# Altium footprint library MY_LIB_Connectors_JST.PcbLib: 118 footprints (part 6 of 8)
Each footprint in its own frame and in the unit in brackets; x right, y up, seen from the top. Pads: shape width x height; smd on the part's side, far side on the other; paste and mask are expansions set on the pad; w line width, h text height; cw(c..) or ccw(c..) is an arc to the next point about the centre after c.
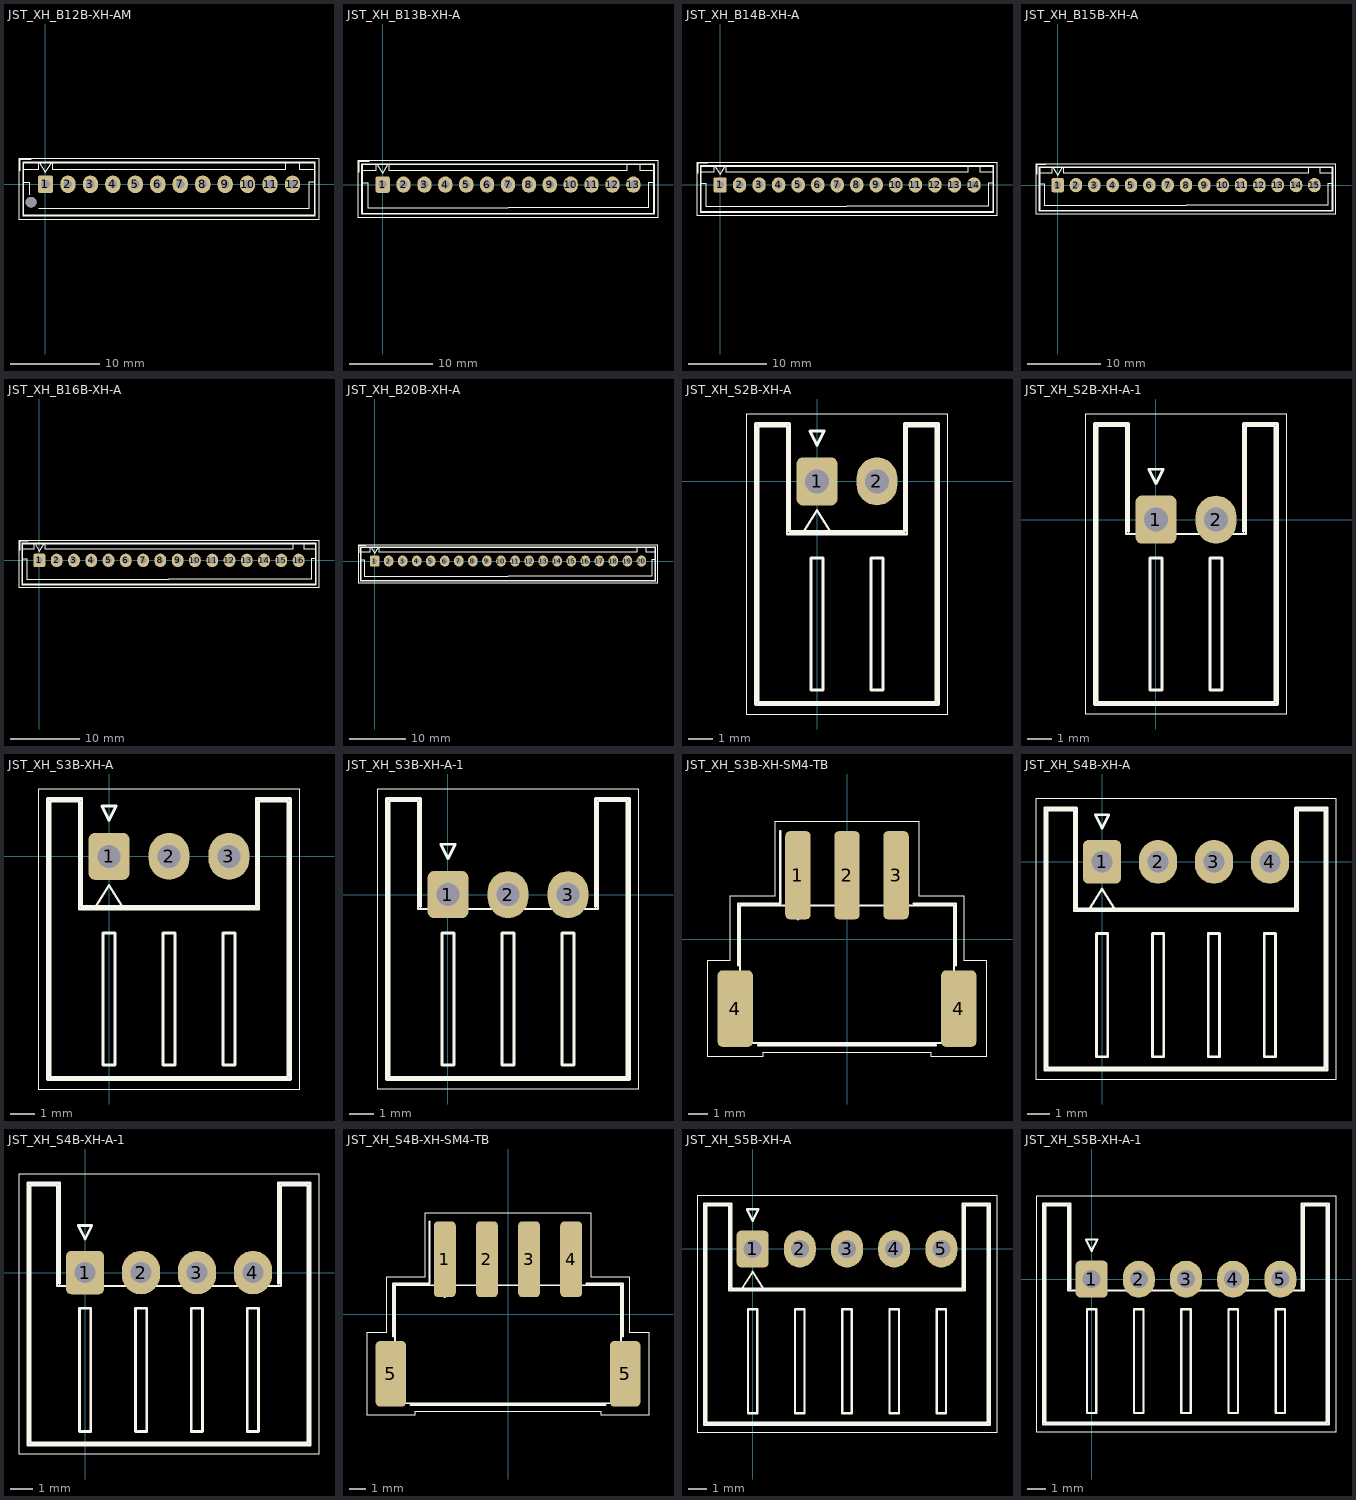
[diagram p5: the footprints below, top view; thin cyan lines are the x and y axes]

## JST_XH_B12B-XH-AM [mm] "JST B12B-XH-AM; reviewed KiCad footprint; ready STEP reference model"
height 7
pads (13):
  rrect29% 1.7x1.95 hole 0.95: 1(0,0)
  oval 1.7x1.95 hole 0.95: 2(2.5,0) 3(5,0) 4(7.5,0) 5(10,0) 6(12.5,0) 7(15,0) 8(17.5,0) 9(20,0) 10(22.5,0) 11(25,0) 12(27.5,0)
  round 1.2 hole 1.2 unplated: ""(-1.6,-2)
Top Overlay:
  lines w0.05: -2.95,-3.9 -2.95,2.85 30.45,2.85 30.45,-3.9 -2.95,-3.9
  lines w0.1: -0.625,2.35 0,1.35 0.625,2.35 ; -2.45,-3.4 -2.45,2.35 29.95,2.35 29.95,-3.4 -2.45,-3.4
  lines w0.12: -2.85,1.5 -2.85,2.75 -1.6,2.75 ; -2.55,0.2 -1.8,0.2 -1.8,-1.14 ; -0.74,-2.75 13.75,-2.75 29.3,-2.75 29.3,0.2 30.05,0.2 ; -2.56,-3.51 -2.56,2.46 30.06,2.46 30.06,-3.51 -2.56,-3.51 ; -2.55,1.7 -2.55,2.45 -0.75,2.45 -0.75,1.7 -2.55,1.7 ; 0.75,1.7 0.75,2.45 26.75,2.45 26.75,1.7 0.75,1.7 ; 28.25,1.7 28.25,2.45 30.05,2.45 30.05,1.7 28.25,1.7
3D body "B12B-XH-AM.step": height 7, standoff -3.5, extent -2.45,-3.4 29.95,2.35

## JST_XH_B13B-XH-A [mm] "JST B13B-XH-A; reviewed KiCad footprint; ready STEP reference model"
height 7
pads (13):
  rrect29% 1.7x1.95 hole 0.95: 1(0,0)
  oval 1.7x1.95 hole 0.95: 2(2.5,0) 3(5,0) 4(7.5,0) 5(10,0) 6(12.5,0) 7(15,0) 8(17.5,0) 9(20,0) 10(22.5,0) 11(25,0) 12(27.5,0) 13(30,0)
Top Overlay:
  lines w0.05: -2.95,-3.9 -2.95,2.85 32.95,2.85 32.95,-3.9 -2.95,-3.9
  lines w0.1: -0.625,2.35 0,1.35 0.625,2.35 ; -2.45,-3.4 -2.45,2.35 32.45,2.35 32.45,-3.4 -2.45,-3.4
  lines w0.12: -2.85,1.5 -2.85,2.75 -1.6,2.75 ; -2.55,0.2 -1.8,0.2 -1.8,-2.75 15,-2.75 31.8,-2.75 31.8,0.2 32.55,0.2 ; -2.56,-3.51 -2.56,2.46 32.56,2.46 32.56,-3.51 -2.56,-3.51 ; -2.55,1.7 -2.55,2.45 -0.75,2.45 -0.75,1.7 -2.55,1.7 ; 0.75,1.7 0.75,2.45 29.25,2.45 29.25,1.7 0.75,1.7 ; 30.75,1.7 30.75,2.45 32.55,2.45 32.55,1.7 30.75,1.7
3D body "JST_XH_B13B-XH-A_1x13_P2.50mm_Vertical.step": height 7, standoff -3.4, extent -2.45,-3.4 32.45,2.35

## JST_XH_B14B-XH-A [mm] "JST B14B-XH-A; reviewed KiCad footprint; ready STEP reference model"
height 7
pads (14):
  rrect29% 1.7x1.95 hole 0.95: 1(0,0)
  oval 1.7x1.95 hole 0.95: 2(2.5,0) 3(5,0) 4(7.5,0) 5(10,0) 6(12.5,0) 7(15,0) 8(17.5,0) 9(20,0) 10(22.5,0) 11(25,0) 12(27.5,0) 13(30,0) 14(32.5,0)
Top Overlay:
  lines w0.05: -2.95,-3.9 -2.95,2.85 35.45,2.85 35.45,-3.9 -2.95,-3.9
  lines w0.1: -0.625,2.35 0,1.35 0.625,2.35 ; -2.45,-3.4 -2.45,2.35 34.95,2.35 34.95,-3.4 -2.45,-3.4
  lines w0.12: -2.85,1.5 -2.85,2.75 -1.6,2.75 ; -2.55,0.2 -1.8,0.2 -1.8,-2.75 16.25,-2.75 34.3,-2.75 34.3,0.2 35.05,0.2 ; -2.56,-3.51 -2.56,2.46 35.06,2.46 35.06,-3.51 -2.56,-3.51 ; -2.55,1.7 -2.55,2.45 -0.75,2.45 -0.75,1.7 -2.55,1.7 ; 0.75,1.7 0.75,2.45 31.75,2.45 31.75,1.7 0.75,1.7 ; 33.25,1.7 33.25,2.45 35.05,2.45 35.05,1.7 33.25,1.7
3D body "JST_XH_B14B-XH-A_1x14_P2.50mm_Vertical.step": height 7, standoff -3.4, extent -2.45,-3.4 34.95,2.35

## JST_XH_B15B-XH-A [mm] "JST B15B-XH-A; reviewed KiCad footprint; ready STEP reference model"
height 7
pads (15):
  rrect29% 1.7x1.95 hole 0.95: 1(0,0)
  oval 1.7x1.95 hole 0.95: 2(2.5,0) 3(5,0) 4(7.5,0) 5(10,0) 6(12.5,0) 7(15,0) 8(17.5,0) 9(20,0) 10(22.5,0) 11(25,0) 12(27.5,0) 13(30,0) 14(32.5,0) 15(35,0)
Top Overlay:
  lines w0.05: -2.95,-3.9 -2.95,2.85 37.95,2.85 37.95,-3.9 -2.95,-3.9
  lines w0.1: -0.625,2.35 0,1.35 0.625,2.35 ; -2.45,-3.4 -2.45,2.35 37.45,2.35 37.45,-3.4 -2.45,-3.4
  lines w0.12: -2.85,1.5 -2.85,2.75 -1.6,2.75 ; -2.55,0.2 -1.8,0.2 -1.8,-2.75 17.5,-2.75 36.8,-2.75 36.8,0.2 37.55,0.2 ; -2.56,-3.51 -2.56,2.46 37.56,2.46 37.56,-3.51 -2.56,-3.51 ; -2.55,1.7 -2.55,2.45 -0.75,2.45 -0.75,1.7 -2.55,1.7 ; 0.75,1.7 0.75,2.45 34.25,2.45 34.25,1.7 0.75,1.7 ; 35.75,1.7 35.75,2.45 37.55,2.45 37.55,1.7 35.75,1.7
3D body "JST_XH_B15B-XH-A_1x15_P2.50mm_Vertical.step": height 7, standoff -3.4, extent -2.45,-3.4 37.45,2.35

## JST_XH_B16B-XH-A [mm] "JST B16B-XH-A; reviewed KiCad footprint; ready STEP reference model"
height 7
pads (16):
  rrect29% 1.7x1.95 hole 0.95: 1(0,0)
  oval 1.7x1.95 hole 0.95: 2(2.5,0) 3(5,0) 4(7.5,0) 5(10,0) 6(12.5,0) 7(15,0) 8(17.5,0) 9(20,0) 10(22.5,0) 11(25,0) 12(27.5,0) 13(30,0) 14(32.5,0) 15(35,0) 16(37.5,0)
Top Overlay:
  lines w0.05: -2.95,-3.9 -2.95,2.85 40.45,2.85 40.45,-3.9 -2.95,-3.9
  lines w0.1: -0.625,2.35 0,1.35 0.625,2.35 ; -2.45,-3.4 -2.45,2.35 39.95,2.35 39.95,-3.4 -2.45,-3.4
  lines w0.12: -2.85,1.5 -2.85,2.75 -1.6,2.75 ; -2.55,0.2 -1.8,0.2 -1.8,-2.75 18.75,-2.75 39.3,-2.75 39.3,0.2 40.05,0.2 ; -2.56,-3.51 -2.56,2.46 40.06,2.46 40.06,-3.51 -2.56,-3.51 ; -2.55,1.7 -2.55,2.45 -0.75,2.45 -0.75,1.7 -2.55,1.7 ; 0.75,1.7 0.75,2.45 36.75,2.45 36.75,1.7 0.75,1.7 ; 38.25,1.7 38.25,2.45 40.05,2.45 40.05,1.7 38.25,1.7
3D body "JST_XH_B16B-XH-A_1x16_P2.50mm_Vertical.step": height 7, standoff -3.4, extent -2.45,-3.4 39.95,2.35

## JST_XH_B20B-XH-A [mm] "JST B20B-XH-A; reviewed KiCad footprint; ready STEP reference model"
height 7
pads (20):
  rrect29% 1.7x1.95 hole 0.95: 1(0,0)
  oval 1.7x1.95 hole 0.95: 2(2.5,0) 3(5,0) 4(7.5,0) 5(10,0) 6(12.5,0) 7(15,0) 8(17.5,0) 9(20,0) 10(22.5,0) 11(25,0) 12(27.5,0) 13(30,0) 14(32.5,0) 15(35,0) 16(37.5,0) 17(40,0) 18(42.5,0) 19(45,0) 20(47.5,0)
Top Overlay:
  lines w0.05: -2.95,-3.9 -2.95,2.85 50.45,2.85 50.45,-3.9 -2.95,-3.9
  lines w0.1: -0.625,2.35 0,1.35 0.625,2.35 ; -2.45,-3.4 -2.45,2.35 49.95,2.35 49.95,-3.4 -2.45,-3.4
  lines w0.12: -2.85,1.5 -2.85,2.75 -1.6,2.75 ; -2.55,0.2 -1.8,0.2 -1.8,-2.75 23.75,-2.75 49.3,-2.75 49.3,0.2 50.05,0.2 ; -2.56,-3.51 -2.56,2.46 50.06,2.46 50.06,-3.51 -2.56,-3.51 ; -2.55,1.7 -2.55,2.45 -0.75,2.45 -0.75,1.7 -2.55,1.7 ; 0.75,1.7 0.75,2.45 46.75,2.45 46.75,1.7 0.75,1.7 ; 48.25,1.7 48.25,2.45 50.05,2.45 50.05,1.7 48.25,1.7
3D body "JST_XH_B20B-XH-A_1x20_P2.50mm_Vertical.step": height 7, standoff -3.4, extent -2.45,-3.4 49.95,2.35

## JST_XH_S2B-XH-A [mm] "JST S2B-XH-A; reviewed KiCad footprint; ready STEP reference model"
height 6.1
pads (2):
  rrect29% 1.7x2 hole 1: 1(0,0)
  oval 1.7x2 hole 1: 2(2.5,0)
Top Overlay:
  lines w0.05: -2.95,-9.7 -2.95,2.81 5.45,2.81 5.45,-9.7 -2.95,-9.7
  lines w0.1: -0.625,-2.2 0,-1.2 0.625,-2.2 ; -2.45,-9.2 -2.45,2.3 -1.25,2.3 -1.25,-2.2 1.25,-2.2 3.75,-2.2 3.75,2.3 4.95,2.3 4.95,-9.2 1.25,-9.2 -2.45,-9.2
  lines w0.12: -2.56,-9.31 -2.56,2.41 -1.14,2.41 -1.14,-2.09 1.25,-2.09 3.64,-2.09 3.64,2.41 5.06,2.41 5.06,-9.31 1.25,-9.31 -2.56,-9.31 ; -0.3,2.1 0.3,2.1 0,1.5 -0.3,2.1 ; -0.25,-8.7 -0.25,-3.2 0.25,-3.2 0.25,-8.7 -0.25,-8.7 ; 2.25,-8.7 2.25,-3.2 2.75,-3.2 2.75,-8.7 2.25,-8.7
3D body "JST_XH_S2B-XH-A_1x02_P2.50mm_Horizontal.step": height 6.1, standoff -3.4, extent -2.45,-9.2 4.95,2.3

## JST_XH_S2B-XH-A-1 [mm] "JST S2B-XH-A-1; reviewed KiCad footprint; ready STEP reference model"
height 6.1
pads (2):
  rrect29% 1.7x2 hole 1: 1(0,0)
  oval 1.7x2 hole 1: 2(2.5,0)
Top Overlay:
  lines w0.05: -2.95,-8.1 -2.95,4.4 5.45,4.4 5.45,-8.1 -2.95,-8.1
  lines w0.1: -0.625,-0.6 0,0.4 0.625,-0.6 ; -2.45,-7.6 -2.45,3.9 -1.25,3.9 -1.25,-0.6 1.25,-0.6 3.75,-0.6 3.75,3.9 4.95,3.9 4.95,-7.6 1.25,-7.6 -2.45,-7.6
  lines w0.12: -1.14,-0.49 -1.14,4.01 -2.56,4.01 -2.56,-7.71 1.25,-7.71 5.06,-7.71 5.06,4.01 3.64,4.01 3.64,-0.49 ; -0.3,2.1 0.3,2.1 0,1.5 -0.3,2.1 ; -0.25,-7.1 -0.25,-1.6 0.25,-1.6 0.25,-7.1 -0.25,-7.1 ; 2.25,-7.1 2.25,-1.6 2.75,-1.6 2.75,-7.1 2.25,-7.1
3D body "JST_XH_S2B-XH-A-1_1x02_P2.50mm_Horizontal.step": height 6.1, standoff -3.4, extent -2.45,-7.6 4.95,3.9

## JST_XH_S3B-XH-A [mm] "JST S3B-XH-A; reviewed KiCad footprint; ready STEP reference model"
height 6.1
pads (3):
  rrect29% 1.7x1.95 hole 0.95: 1(0,0)
  oval 1.7x1.95 hole 0.95: 2(2.5,0) 3(5,0)
Top Overlay:
  lines w0.05: -2.95,-9.7 -2.95,2.81 7.95,2.81 7.95,-9.7 -2.95,-9.7
  lines w0.1: -0.625,-2.2 0,-1.2 0.625,-2.2 ; -2.45,-9.2 -2.45,2.3 -1.25,2.3 -1.25,-2.2 2.5,-2.2 6.25,-2.2 6.25,2.3 7.45,2.3 7.45,-9.2 2.5,-9.2 -2.45,-9.2
  lines w0.12: -2.56,-9.31 -2.56,2.41 -1.14,2.41 -1.14,-2.09 2.5,-2.09 6.14,-2.09 6.14,2.41 7.56,2.41 7.56,-9.31 2.5,-9.31 -2.56,-9.31 ; -0.3,2.1 0.3,2.1 0,1.5 -0.3,2.1 ; -0.25,-8.7 -0.25,-3.2 0.25,-3.2 0.25,-8.7 -0.25,-8.7 ; 2.25,-8.7 2.25,-3.2 2.75,-3.2 2.75,-8.7 2.25,-8.7 ; 4.75,-8.7 4.75,-3.2 5.25,-3.2 5.25,-8.7 4.75,-8.7
3D body "JST_XH_S3B-XH-A_1x03_P2.50mm_Horizontal.step": height 6.1, standoff -3.4, extent -2.45,-9.2 7.45,2.3

## JST_XH_S3B-XH-A-1 [mm] "JST S3B-XH-A-1; reviewed KiCad footprint; ready STEP reference model"
height 6.1
pads (3):
  rrect29% 1.7x1.95 hole 0.95: 1(0,0)
  oval 1.7x1.95 hole 0.95: 2(2.5,0) 3(5,0)
Top Overlay:
  lines w0.05: -2.95,-8.1 -2.95,4.4 7.95,4.4 7.95,-8.1 -2.95,-8.1
  lines w0.1: -0.625,-0.6 0,0.4 0.625,-0.6 ; -2.45,-7.6 -2.45,3.9 -1.25,3.9 -1.25,-0.6 2.5,-0.6 6.25,-0.6 6.25,3.9 7.45,3.9 7.45,-7.6 2.5,-7.6 -2.45,-7.6
  lines w0.12: -1.14,-0.49 -1.14,4.01 -2.56,4.01 -2.56,-7.71 2.5,-7.71 7.56,-7.71 7.56,4.01 6.14,4.01 6.14,-0.49 ; -0.3,2.1 0.3,2.1 0,1.5 -0.3,2.1 ; -0.25,-7.1 -0.25,-1.6 0.25,-1.6 0.25,-7.1 -0.25,-7.1 ; 2.25,-7.1 2.25,-1.6 2.75,-1.6 2.75,-7.1 2.25,-7.1 ; 4.75,-7.1 4.75,-1.6 5.25,-1.6 5.25,-7.1 4.75,-7.1
3D body "JST_XH_S3B-XH-A-1_1x03_P2.50mm_Horizontal.step": height 6.1, standoff -3.4, extent -2.45,-7.6 7.45,3.9

## JST_XH_S3B-XH-SM4-TB [mm] "JST S3B-XH-SM4-TB; reviewed KiCad footprint; ready STEP reference model"
height 6
pads (5):
  rrect38% 1.3x4.5 all layers, no hole: 1(-2.5,3.25) 2(0,3.25) 3(2.5,3.25)
  rrect28% 1.8x3.9 all layers, no hole: 4(-5.7,-3.55) 4(5.7,-3.55)
Top Overlay:
  lines w0.05: -7.1,-6 -7.1,-1.09 -5.95,-1.09 -5.95,2.2 -3.65,2.2 -3.65,6 3.65,6 3.65,2.2 5.95,2.2 5.95,-1.09 7.1,-1.09 7.1,-6 4.29,-6 4.29,-5.8 -4.29,-5.8 -4.29,-6 -7.1,-6
  lines w0.1: -3,1.7 -2.5,0.993 -2,1.7 ; -5.45,-5.3 -5.45,1.7 5.45,1.7 5.45,-5.3 -5.45,-5.3
  lines w0.12: -5.56,-1.34 -5.56,1.81 -3.41,1.81 -3.41,5.5 ; -4.54,-5.41 4.54,-5.41 ; 3.41,1.81 5.56,1.81 5.56,-1.34
3D body "JST_XH_S3B-XH-SM4-TB_1x03-1MP_P2.50mm_Horizontal.step": height 6, standoff 0, extent -5.45,-5.3 5.45,1.7

## JST_XH_S4B-XH-A [mm] "JST S4B-XH-A; reviewed KiCad footprint; ready STEP reference model"
height 6.1
pads (4):
  rrect29% 1.7x1.95 hole 0.95: 1(0,0)
  oval 1.7x1.95 hole 0.95: 2(2.5,0) 3(5,0) 4(7.5,0)
Top Overlay:
  lines w0.05: -2.95,-9.7 -2.95,2.81 10.45,2.81 10.45,-9.7 -2.95,-9.7
  lines w0.1: -0.625,-2.2 0,-1.2 0.625,-2.2 ; -2.45,-9.2 -2.45,2.3 -1.25,2.3 -1.25,-2.2 3.75,-2.2 8.75,-2.2 8.75,2.3 9.95,2.3 9.95,-9.2 3.75,-9.2 -2.45,-9.2
  lines w0.12: -2.56,-9.31 -2.56,2.41 -1.14,2.41 -1.14,-2.09 3.75,-2.09 8.64,-2.09 8.64,2.41 10.06,2.41 10.06,-9.31 3.75,-9.31 -2.56,-9.31 ; -0.3,2.1 0.3,2.1 0,1.5 -0.3,2.1 ; -0.25,-8.7 -0.25,-3.2 0.25,-3.2 0.25,-8.7 -0.25,-8.7 ; 2.25,-8.7 2.25,-3.2 2.75,-3.2 2.75,-8.7 2.25,-8.7 ; 4.75,-8.7 4.75,-3.2 5.25,-3.2 5.25,-8.7 4.75,-8.7 ; 7.25,-8.7 7.25,-3.2 7.75,-3.2 7.75,-8.7 7.25,-8.7
3D body "JST_XH_S4B-XH-A_1x04_P2.50mm_Horizontal.step": height 6.1, standoff -3.4, extent -2.45,-9.2 9.95,2.3

## JST_XH_S4B-XH-A-1 [mm] "JST S4B-XH-A-1; reviewed KiCad footprint; ready STEP reference model"
height 6.1
pads (4):
  rrect29% 1.7x1.95 hole 0.95: 1(0,0)
  oval 1.7x1.95 hole 0.95: 2(2.5,0) 3(5,0) 4(7.5,0)
Top Overlay:
  lines w0.05: -2.95,-8.1 -2.95,4.4 10.45,4.4 10.45,-8.1 -2.95,-8.1
  lines w0.1: -0.625,-0.6 0,0.4 0.625,-0.6 ; -2.45,-7.6 -2.45,3.9 -1.25,3.9 -1.25,-0.6 3.75,-0.6 8.75,-0.6 8.75,3.9 9.95,3.9 9.95,-7.6 3.75,-7.6 -2.45,-7.6
  lines w0.12: -1.14,-0.49 -1.14,4.01 -2.56,4.01 -2.56,-7.71 3.75,-7.71 10.06,-7.71 10.06,4.01 8.64,4.01 8.64,-0.49 ; -0.3,2.1 0.3,2.1 0,1.5 -0.3,2.1 ; -0.25,-7.1 -0.25,-1.6 0.25,-1.6 0.25,-7.1 -0.25,-7.1 ; 2.25,-7.1 2.25,-1.6 2.75,-1.6 2.75,-7.1 2.25,-7.1 ; 4.75,-7.1 4.75,-1.6 5.25,-1.6 5.25,-7.1 4.75,-7.1 ; 7.25,-7.1 7.25,-1.6 7.75,-1.6 7.75,-7.1 7.25,-7.1
3D body "JST_XH_S4B-XH-A-1_1x04_P2.50mm_Horizontal.step": height 6.1, standoff -3.4, extent -2.45,-7.6 9.95,3.9

## JST_XH_S4B-XH-SM4-TB [mm] "JST S4B-XH-SM4-TB; reviewed KiCad footprint; ready STEP reference model"
height 6
pads (6):
  rrect38% 1.3x4.5 all layers, no hole: 1(-3.75,3.25) 2(-1.25,3.25) 3(1.25,3.25) 4(3.75,3.25)
  rrect28% 1.8x3.9 all layers, no hole: 5(-6.95,-3.55) 5(6.95,-3.55)
Top Overlay:
  lines w0.05: -8.35,-6 -8.35,-1.09 -7.2,-1.09 -7.2,2.2 -4.9,2.2 -4.9,6 4.9,6 4.9,2.2 7.2,2.2 7.2,-1.09 8.35,-1.09 8.35,-6 5.54,-6 5.54,-5.8 -5.54,-5.8 -5.54,-6 -8.35,-6
  lines w0.1: -4.25,1.7 -3.75,0.993 -3.25,1.7 ; -6.7,-5.3 -6.7,1.7 6.7,1.7 6.7,-5.3 -6.7,-5.3
  lines w0.12: -6.81,-1.34 -6.81,1.81 -4.66,1.81 -4.66,5.5 ; -5.79,-5.41 5.79,-5.41 ; 4.66,1.81 6.81,1.81 6.81,-1.34
3D body "JST_XH_S4B-XH-SM4-TB_1x04-1MP_P2.50mm_Horizontal.step": height 6, standoff 0, extent -6.7,-5.3 6.7,1.7

## JST_XH_S5B-XH-A [mm] "JST S5B-XH-A; reviewed KiCad footprint; ready STEP reference model"
height 6.1
pads (5):
  rrect29% 1.7x1.95 hole 0.95: 1(0,0)
  oval 1.7x1.95 hole 0.95: 2(2.5,0) 3(5,0) 4(7.5,0) 5(10,0)
Top Overlay:
  lines w0.05: -2.95,-9.7 -2.95,2.81 12.95,2.81 12.95,-9.7 -2.95,-9.7
  lines w0.1: -0.625,-2.2 0,-1.2 0.625,-2.2 ; -2.45,-9.2 -2.45,2.3 -1.25,2.3 -1.25,-2.2 5,-2.2 11.25,-2.2 11.25,2.3 12.45,2.3 12.45,-9.2 5,-9.2 -2.45,-9.2
  lines w0.12: -2.56,-9.31 -2.56,2.41 -1.14,2.41 -1.14,-2.09 5,-2.09 11.14,-2.09 11.14,2.41 12.56,2.41 12.56,-9.31 5,-9.31 -2.56,-9.31 ; -0.3,2.1 0.3,2.1 0,1.5 -0.3,2.1 ; -0.25,-8.7 -0.25,-3.2 0.25,-3.2 0.25,-8.7 -0.25,-8.7 ; 2.25,-8.7 2.25,-3.2 2.75,-3.2 2.75,-8.7 2.25,-8.7 ; 4.75,-8.7 4.75,-3.2 5.25,-3.2 5.25,-8.7 4.75,-8.7 ; 7.25,-8.7 7.25,-3.2 7.75,-3.2 7.75,-8.7 7.25,-8.7 ; 9.75,-8.7 9.75,-3.2 10.25,-3.2 10.25,-8.7 9.75,-8.7
3D body "JST_XH_S5B-XH-A_1x05_P2.50mm_Horizontal.step": height 6.1, standoff -3.4, extent -2.45,-9.2 12.45,2.3

## JST_XH_S5B-XH-A-1 [mm] "JST S5B-XH-A-1; reviewed KiCad footprint; ready STEP reference model"
height 6.1
pads (5):
  rrect29% 1.7x1.95 hole 0.95: 1(0,0)
  oval 1.7x1.95 hole 0.95: 2(2.5,0) 3(5,0) 4(7.5,0) 5(10,0)
Top Overlay:
  lines w0.05: -2.95,-8.1 -2.95,4.4 12.95,4.4 12.95,-8.1 -2.95,-8.1
  lines w0.1: -0.625,-0.6 0,0.4 0.625,-0.6 ; -2.45,-7.6 -2.45,3.9 -1.25,3.9 -1.25,-0.6 5,-0.6 11.25,-0.6 11.25,3.9 12.45,3.9 12.45,-7.6 5,-7.6 -2.45,-7.6
  lines w0.12: -1.14,-0.49 -1.14,4.01 -2.56,4.01 -2.56,-7.71 5,-7.71 12.56,-7.71 12.56,4.01 11.14,4.01 11.14,-0.49 ; -0.3,2.1 0.3,2.1 0,1.5 -0.3,2.1 ; -0.25,-7.1 -0.25,-1.6 0.25,-1.6 0.25,-7.1 -0.25,-7.1 ; 2.25,-7.1 2.25,-1.6 2.75,-1.6 2.75,-7.1 2.25,-7.1 ; 4.75,-7.1 4.75,-1.6 5.25,-1.6 5.25,-7.1 4.75,-7.1 ; 7.25,-7.1 7.25,-1.6 7.75,-1.6 7.75,-7.1 7.25,-7.1 ; 9.75,-7.1 9.75,-1.6 10.25,-1.6 10.25,-7.1 9.75,-7.1
3D body "JST_XH_S5B-XH-A-1_1x05_P2.50mm_Horizontal.step": height 6.1, standoff -3.4, extent -2.45,-7.6 12.45,3.9